# Altium footprint library CustomCase.PcbLib: 411 footprints (part 26 of 26)
Each footprint in its own frame and in the unit in brackets; x right, y up, seen from the top. Pads: shape width x height; smd on the part's side, far side on the other; paste and mask are expansions set on the pad; w line width, h text height; cw(c..) or ccw(c..) is an arc to the next point about the centre after c.
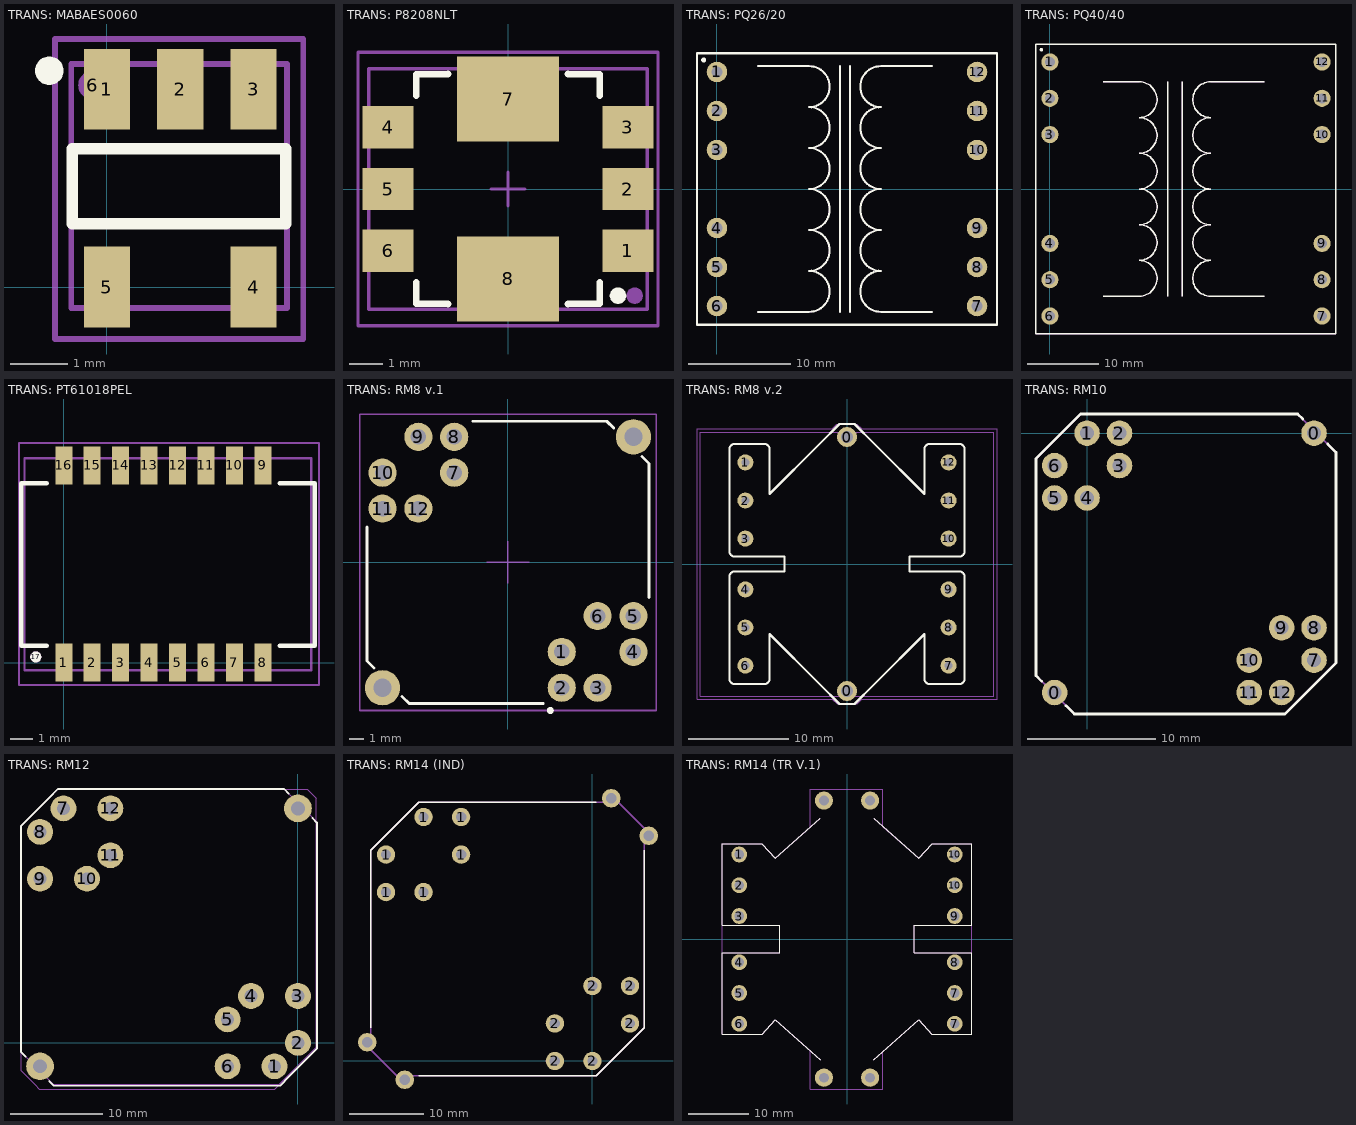
[diagram p25: the footprints below, top view; thin cyan lines are the x and y axes]

## TRANS: MABAES0060 [mm]
pads (7):
  rect 0.8x1.4 smd: 1(0,3.43) 2(1.27,3.43) 3(2.54,3.43) 4(2.54,0) 5(0,0)
  round 0.5 on Mech1: 6(-0.25,3.5)
  round 0.5 on Top Overlay: ""(-1,3.75)
Top Overlay:
  lines w0.2: -0.6,1.1 3.1,1.1 3.1,2.4 -0.6,2.4 -0.6,1.1
Top Assy:
  lines w0.1: -0.62,-0.365 -0.62,3.865 3.12,3.865 3.12,-0.365 -0.62,-0.365
Size Area:
  lines w0.1: -0.9,-0.9 3.4,-0.9 3.4,4.3 -0.9,4.3 -0.9,-0.9
3D body "User Library-FluxBalun.STEP": height -1, standoff -4.55, extent -0.62,-0.365 3.12,3.865

## TRANS: P8208NLT [mm]
pads (10):
  rect 1.52x1.27 smd: 1(3.6,-1.85) 2(3.6,0) 3(3.6,1.85) 4(-3.6,1.85) 5(-3.6,0) 6(-3.6,-1.85)
  rect 3.05x2.54 smd: 7(0,2.7) 8(0,-2.7)
  round 0.5 on Top Overlay: ""(3.3,-3.2)
  round 0.5 on Mech1: ""(3.8,-3.2)
Top Overlay:
  lines w0.2: -2.75,-2.8 -2.75,-3.445 -1.8,-3.45 ; -2.75,2.8 -2.75,3.445 -1.8,3.45 ; 1.8,-3.45 2.75,-3.445 2.75,-2.8 ; 1.8,3.45 2.75,3.445 2.75,2.8
Top Assy:
  lines w0.1: -4.175,-3.605 4.175,-3.605 4.175,3.605 -4.175,3.605 -4.175,-3.605
Size Area:
  lines w0.1: -0.5,0 0.5,0 ; 0,-0.5 0,0.5 ; -4.5,-4.1 -4.5,4.1 4.5,4.1 4.5,-4.1 -4.5,-4.1
3D body "CurrentTrans v3.step": height 5.5, standoff 0, extent -4.175,-3.605 4.175,3.605

## TRANS: PQ26/20 [mm]
pads (13):
  round 2 hole 1.1: 1(0,11.43) 2(0,7.62) 3(0,3.81) 4(0,-3.81) 5(0,-7.62) 6(0,-11.43) 7(25.4,-11.43) 8(25.4,-7.62) 9(25.4,-3.81) 10(25.4,3.81) 11(25.4,7.62) 12(25.4,11.43)
  round 0.5 on Top Overlay: ""(-1.3,12.6)
Top Overlay:
  lines w0.2: 4,-12 9,-12 ccw(c9,-10) 9,-8 ccw(c9,-6) 9,-4 ccw(c9,-2) 9,0 ccw(c9,2) 9,4 ccw(c9,6) 9,8 ccw(c9,10) 9,12 4,12 ; 12,-12 12,12 ; 13,-12 13,12 ; 21,-12 16,-12 cw(c16,-10) 16,-8 cw(c16,-6) 16,-4 cw(c16,-2) 16,0 cw(c16,2) 16,4 cw(c16,6) 16,8 cw(c16,10) 16,12 21,12 ; -1.95,-13.26 -1.95,13.26 27.35,13.26 27.35,-13.26 -1.95,-13.26
Top Assy:
  lines w0.1: 4,-12 9,-12 ccw(c9,-10) 9,-8 ccw(c9,-6) 9,-4 ccw(c9,-2) 9,0 ccw(c9,2) 9,4 ccw(c9,6) 9,8 ccw(c9,10) 9,12 4,12 ; 12,-12 12,12 ; 13,-12 13,12 ; 21,-12 16,-12 cw(c16,-10) 16,-8 cw(c16,-6) 16,-4 cw(c16,-2) 16,0 cw(c16,2) 16,4 cw(c16,6) 16,8 cw(c16,10) 16,12 21,12 ; -1.95,-13.26 -1.95,13.26 27.35,13.26 27.35,-13.26 -1.95,-13.26
Size Area:
  lines w0.1: -1.95,-13.26 -1.95,13.26 27.35,13.26 27.35,-13.26 -1.95,-13.26
3D body "EPCOS_pq2620.step": height 25.1, standoff -3.6, extent -1.95,-13.26 27.35,13.26

## TRANS: PQ40/40 [mm]
pads (13):
  round 2.4 hole 1.4: 1(0,17.78) 2(0,12.7) 3(0,7.62) 4(0,-7.62) 5(0,-12.7) 6(0,-17.78) 7(38.1,-17.78) 8(38.1,-12.7) 9(38.1,-7.62) 10(38.1,7.62) 11(38.1,12.7) 12(38.1,17.78)
  round 0.5 on Top Overlay: ""(-1.2,19.5)
Top Overlay:
  lines w0.2: 7.5,-15 12.5,-15 ccw(c12.5,-12.5) 12.5,-10 ccw(c12.5,-7.5) 12.5,-5 ccw(c12.5,-2.5) 12.5,0 ccw(c12.5,2.5) 12.5,5 ccw(c12.5,7.5) 12.5,10 ccw(c12.5,12.5) 12.5,15 7.5,15 ; 16.5,-15 16.5,15 ; 18.5,-15 18.5,15 ; 30,-15 22.5,-15 cw(c22.5,-12.5) 22.5,-10 cw(c22.5,-7.5) 22.5,-5 cw(c22.5,-2.5) 22.5,0 cw(c22.5,2.5) 22.5,5 cw(c22.5,7.5) 22.5,10 cw(c22.5,12.5) 22.5,15 30,15 ; -1.95,-20.251 40.05,-20.251 40.05,20.251 -1.95,20.251 -1.95,-20.251
Top Assy:
  lines w0.1: 7.5,-15 12.5,-15 ccw(c12.5,-12.5) 12.5,-10 ccw(c12.5,-7.5) 12.5,-5 ccw(c12.5,-2.5) 12.5,0 ccw(c12.5,2.5) 12.5,5 ccw(c12.5,7.5) 12.5,10 ccw(c12.5,12.5) 12.5,15 7.5,15 ; 16.5,-15 16.5,15 ; 18.5,-15 18.5,15 ; 30,-15 22.5,-15 cw(c22.5,-12.5) 22.5,-10 cw(c22.5,-7.5) 22.5,-5 cw(c22.5,-2.5) 22.5,0 cw(c22.5,2.5) 22.5,5 cw(c22.5,7.5) 22.5,10 cw(c22.5,12.5) 22.5,15 30,15 ; -1.95,-20.251 40.05,-20.251 40.05,20.251 -1.95,20.251 -1.95,-20.251
Size Area:
  lines w0.1: -1.95,-20.251 40.05,-20.251 40.05,20.251 -1.95,20.251 -1.95,-20.251
3D body "40 v10.step": height 45.2, standoff -3.4, extent -1.95,-20.251 40.05,20.251

## TRANS: PT61018PEL [mm]
pads (18):
  rect 0.76x1.7 smd: 1(0,0) 2(1.27,0) 3(2.54,0) 4(3.81,0) 5(5.08,0) 6(6.35,0) 7(7.62,0) 8(8.89,0) 9(8.89,8.8) 10(7.62,8.8) 11(6.35,8.8) 12(5.08,8.8) 13(3.81,8.8) 14(2.54,8.8) 15(1.27,8.8) 16(0,8.8)
  round 0.5 on Mech1: 17(-1.25,0.25)
  round 0.5 on Top Overlay: ""(-1.25,0.25)
Top Overlay:
  lines w0.2: -0.75,0.75 -1.9,0.75 -1.9,8 -0.75,8 ; 9.65,0.75 11.2,0.75 11.2,8 9.65,8
Top Assy:
  lines w0.1: -1.75,-0.35 -1.75,9.128 11.05,9.128 11.05,-0.35 -1.75,-0.35
Size Area:
  lines w0.1: -2,-1 11.4,-1 11.4,9.8 -2,9.8 -2,-1
3D body "PT61018PEL.stp": height 6.01, standoff -0.04, extent -1.75,-0.35 11.05,9.128

## TRANS: RM8 v.1 [mm]
pads (15):
  round 2 hole 1.1: 1(3.81,-6.35) 2(3.81,-8.89) 3(6.35,-8.89) 4(8.89,-6.35) 5(8.89,-3.81) 6(6.35,-3.81) 7(-3.81,6.35) 8(-3.81,8.89) 9(-6.35,8.89) 10(-8.89,6.35) 11(-8.89,3.81) 12(-6.35,3.81)
  round 2.5 hole 1.3: ""(-8.89,-8.89) ""(8.89,8.89)
  round 0.5 on Top Overlay: ""(3,-10.5)
Top Overlay:
  lines w0.2: -10,2.5 -10,-7 ; -9.5,-7.5 -10,-7 ; -7.5,-9.5 -7,-10 ; -2.5,10 7,10 ; 2.5,-10 -7,-10 ; 7.5,9.5 7,10 ; 9.5,7.5 10,7 ; 10,-2.5 10,7 ; -10,-7 -10,-7 ; -7,-10 -7,-10 ; 7,10 7,10 ; 10,7 10,7
Top Assy:
  lines w0.1: -10.51,-10.51 -10.51,10.51 10.511,10.51 10.511,-10.51 -10.51,-10.51
Size Area:
  lines w0.1: -1.5,0 1.5,0 ; 0,-1.5 0,1.5 ; -10.5,-10.5 -10.5,10.5 10.5,10.5 10.5,-10.5 -10.5,-10.5
3D body "User Library-RM8.STEP": height 16.45, standoff -3.37, extent -10.51,-10.51 10.511,10.51

## TRANS: RM8 v.2 [mm]
pads (14):
  round 2 hole 1.2: 0(0,-12.7) 0(0,12.7)
  round 1.6 hole 0.8: 1(-10.16,10.16) 2(-10.16,6.35) 3(-10.16,2.54) 4(-10.16,-2.54) 5(-10.16,-6.35) 6(-10.16,-10.16) 7(10.16,-10.16) 8(10.16,-6.35) 9(10.16,-2.54) 10(10.16,2.54) 11(10.16,6.35) 12(10.16,10.16)
Top Overlay:
  lines w0.2: -11.75,-11.5 ccw(c-11.25,-11.5) -11.25,-12 -8.25,-12 ccw(c-8.25,-11.5) -7.75,-11.5 -7.75,-7 -2.71,-12.04 -0.75,-14 0,-14 0.75,-14 2.71,-12.04 7.75,-7 7.75,-11.5 ccw(c8.25,-11.5) 8.25,-12 11.25,-12 ccw(c11.25,-11.5) 11.75,-11.5 11.75,-1.25 ccw(c11.25,-1.25) 11.25,-0.75 6.25,-0.75 6.25,0.75 11.25,0.75 ccw(c11.25,1.25) 11.75,1.25 11.75,11.5 ccw(c11.25,11.5) 11.25,12 8.25,12 ccw(c8.25,11.5) 7.75,11.5 7.75,7 2.71,12.04 0.75,14 0,14 -0.75,14 -2.71,12.04 -7.75,7 -7.75,11.5 ccw(c-8.25,11.5) -8.25,12 -11.25,12 ccw(c-11.25,11.5) -11.75,11.5 -11.75,1.25 ccw(c-11.25,1.25) -11.25,0.75 -6.25,0.75 -6.25,-0.75 -11.25,-0.75 ccw(c-11.25,-1.25) -11.75,-1.25 -11.75,-11.5
Top Assy:
  lines w0.1: -14.7,-13.215 -14.7,13.196 14.7,13.196 14.7,-13.215 -14.7,-13.215
Size Area:
  lines w0.1: -15,-13.5 -1.5,-13.5 -1,-14 0.25,-14 1,-14 1.5,-13.5 15,-13.5 15,13.5 1.5,13.5 1,14 -0.5,14 -1,14 -1.5,13.5 -15,13.5 -15,-13.5
3D body "User Library-RM8 transformer.STEP": height 16.5, standoff -4.45, extent -14.7,-13.215 14.7,13.196

## TRANS: RM10 [mm]
height 19
pads (14):
  round 2 hole 1.1: 0(-2.54,-20.32) 0(17.78,0) 1(0,0) 2(2.54,0) 3(2.54,-2.54) 4(0,-5.08) 5(-2.54,-5.08) 6(-2.54,-2.54) 7(17.78,-17.78) 8(17.78,-15.24) 9(15.24,-15.24) 10(12.7,-17.78) 11(12.7,-20.32) 12(15.24,-20.32)
Top Overlay:
  lines w0.2: -3.55,-19.45 -4,-19 ; -1.65,-21.35 -1,-22 ; 16.9,1.1 16.5,1.5 16.28,1.5 -0.5,1.5 -4,-2 -4,-19 ; 18.85,-0.85 19.5,-1.5 19.5,-1.72 19.5,-18 15.5,-22 ; -4,-19 -4,-19 ; -1,-22 15.5,-22 ; -1,-22 -1,-22 ; 15.5,-22 15.5,-22
Top Assy:
  lines w0.1: -4,-19 -4,-2 -0.5,1.5 16.5,1.5 19.5,-1.5 19.5,-18 15.5,-22 -1,-22 -4,-19
Size Area:
  lines w0.1: -4,-19 -4,-2 -0.5,1.5 16.5,1.5 19.5,-1.5 19.5,-18 15.5,-22 -1,-22 -4,-19
3D body "RM10.STEP": height 19.27, standoff -3.22, extent -13.142,-31.019 28.511,10.635

## TRANS: RM12 [mm]
pads (14):
  round 2.8 hole 1.4: 1(-2.54,-2.54) 2(0,0) 3(0,5.08) 4(-5.08,5.08) 5(-7.62,2.54) 6(-7.62,-2.54) 7(-25.4,25.4) 8(-27.94,22.86) 9(-27.94,17.78) 10(-22.86,17.78) 11(-20.32,20.32) 12(-20.32,25.4)
  round 3 hole 1.5: ""(-27.94,-2.54) ""(0,25.4)
Top Overlay:
  lines w0.2: -29.5,-1.5 -30,-1 ; -26.94,-4.14 -26.44,-4.64 -1.94,-4.64 -0.94,-3.64 2.06,-0.64 2.06,23.86 ; -1,27 -1.5,27.5 -26,27.5 -27,26.5 -30,23.5 -30,-1 ; 1.56,24.36 2.06,23.86 ; -30,-1 -30,-1 ; 2.06,23.86 2.06,23.86
Top Assy:
  lines w0.1: -30,-1 -30,23.5 -26,27.5 -1.5,27.5 2,24 2,-0.5 -2,-4.5 -26.5,-4.5 -30,-1
Size Area:
  lines w0.1: -30,-3 -28.5,-4.5 -28,-5 -2.5,-5 2,-0.5 2,6 2,26.5 1.5,27 1,27.5 -26,27.5 -27.5,26 -30,23.5 -30,20.5 -30,-3
3D body "User Library-RM12-1.STEP": height 24.65, standoff -3.95, extent -41.68,-16.28 13.681,39.081

## TRANS: RM14 (IND) [mm]
pads (16):
  round 2.5 hole 1.4: 1(-27.94,22.86) 1(-27.94,27.94) 1(-22.86,22.86) 1(-22.86,33.02) 1(-17.78,27.94) 1(-17.78,33.02) 2(-5.08,0) 2(-5.08,5.08) 2(0,0) 2(0,10.16) 2(5.08,5.08) 2(5.08,10.16) ""(-30.48,2.54) ""(-25.4,-2.54) ""(2.54,35.56) ""(7.62,30.48)
Top Overlay:
  lines w0.2: -30,4.5 -30,28.5 -23.5,35 0.5,35 ; -23.5,-2 0.5,-2 7,4.5 7,28.5
Top Assy:
  lines w0.2: -30,1.5 -30,28.5 -23.5,35 -21,35 3.5,35 7,31.5 7,4.5 0.5,-2 -26.5,-2 -30,1.5
Size Area:
  lines w0.1: -30,1.5 -26.5,-2 0.5,-2 7,4.5 7,31.5 3.5,35 -23.5,35 -30,28.5 -30,1.5
3D body "STEP-WE-PFC-RM14-rev1.stp": height 30.1, standoff -4, extent -43.036,-15.036 20.036,48.036

## TRANS: RM14 (TR V.1) [mm]
pads (16):
  round 2.6 hole 1.6: 1(-17.78,13.97) 2(-17.78,8.89) 3(-17.78,3.81) 4(-17.78,-3.81) 5(-17.78,-8.89) 6(-17.78,-13.97) 7(17.78,-13.97) 7(17.78,-8.89) 8(17.78,-3.81) 9(17.78,3.81) 10(17.78,8.89) 10(17.78,13.97)
  round 3 hole 1.6: ""(-3.81,-22.86) ""(-3.81,22.86) ""(3.81,-22.86) ""(3.81,22.86)
Top Overlay:
  lines w0.2: -4.38,-19.93 -11.88,-13.33 -13.992,-15.73 -20.58,-15.73 -20.58,-2.23 -11.08,-2.23 -11.08,2.27 -20.58,2.27 -20.58,15.77 -14.027,15.77 -11.88,13.33 -4.38,19.93 ; 4.38,-19.93 11.88,-13.33 13.987,-15.724 20.58,-15.724 ; 4.38,19.93 11.88,13.33 14.027,15.77 20.58,15.77 20.58,2.27 11.08,2.27 11.08,-2.23 20.58,-2.23 20.58,-15.73
Top Assy:
  lines w0.1: -4.38,-19.93 -11.88,-13.33 -13.992,-15.73 -20.58,-15.73 -20.58,-2.23 -11.08,-2.23 -11.08,2.27 -20.58,2.27 -20.58,15.77 -14.027,15.77 -11.88,13.33 -4.38,19.93 ; 4.38,-19.93 11.88,-13.33 13.987,-15.724 20.58,-15.724 ; 4.38,19.93 11.88,13.33 14.027,15.77 20.58,15.77 20.58,2.27 11.08,2.27 11.08,-2.23 20.58,-2.23 20.58,-15.73
Size Area:
  lines w0.1: -20.58,-15.73 -20.58,15.77 -14.027,15.77 -11.88,13.33 -6.08,18.434 -6.08,24.77 5.92,24.77 5.92,18.57 11.88,13.33 14.027,15.77 20.58,15.77 20.58,2.27 20.58,-2.23 20.58,-15.724 13.987,-15.724 11.88,-13.33 5.92,-18.575 5.92,-24.73 -6.08,-24.73 -6.08,-18.43 -11.88,-13.33 -13.992,-15.73 -20.58,-15.73
3D body "6666.STEP": height 30.72, standoff -4.3, extent -20.5,-23.556 20.5,23.556